# Altium footprint library BOURNS_SRF2012.PcbLib: 1 footprints
Each footprint in its own frame and in the unit in brackets; x right, y up, seen from the top. Pads: shape width x height; smd on the part's side, far side on the other; paste and mask are expansions set on the pad; w line width, h text height; cw(c..) or ccw(c..) is an arc to the next point about the centre after c.
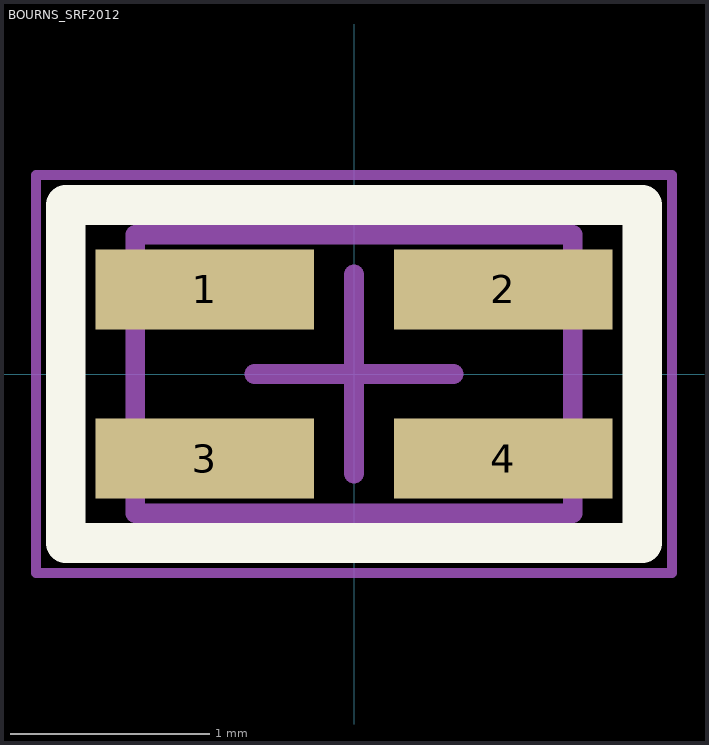
[diagram p0: the footprint, top view; thin cyan lines are the x and y axes]

## BOURNS_SRF2012 [mm]
height 4.5
pads (4):
  rect 1.1x0.4 smd: 1(-0.75,0.425) 2(0.75,0.425) 3(-0.75,-0.425) 4(0.75,-0.425)
Top Overlay:
  lines w0.2: -1.45,-0.85 -1.45,0 -1.45,0.85 0,0.85 1.45,0.85 1.45,0 1.45,-0.85 0,-0.85 -1.45,-0.85
Mechanical 13:
  lines w0.1: -1.1,-0.7 -1.1,0.7 1.1,0.7 1.1,-0.7 -1.1,-0.7
Mechanical 15:
  lines w0.05: -1.6,-1 -1.6,1 1.6,1 1.6,-1 -1.6,-1
  lines w0.1: -0.5,0 0.5,0 ; 0,-0.5 0,0.5
3D body "srf2012-361ya.stp": height 1.26, standoff 0.01, extent -1.025,-0.625 1.025,0.625